# Altium footprint library unmodified_headers.PcbLib: 106 footprints (part 2 of 7)
Each footprint in its own frame and in the unit in brackets; x right, y up, seen from the top. Pads: shape width x height; smd on the part's side, far side on the other; paste and mask are expansions set on the pad; w line width, h text height; cw(c..) or ccw(c..) is an arc to the next point about the centre after c.
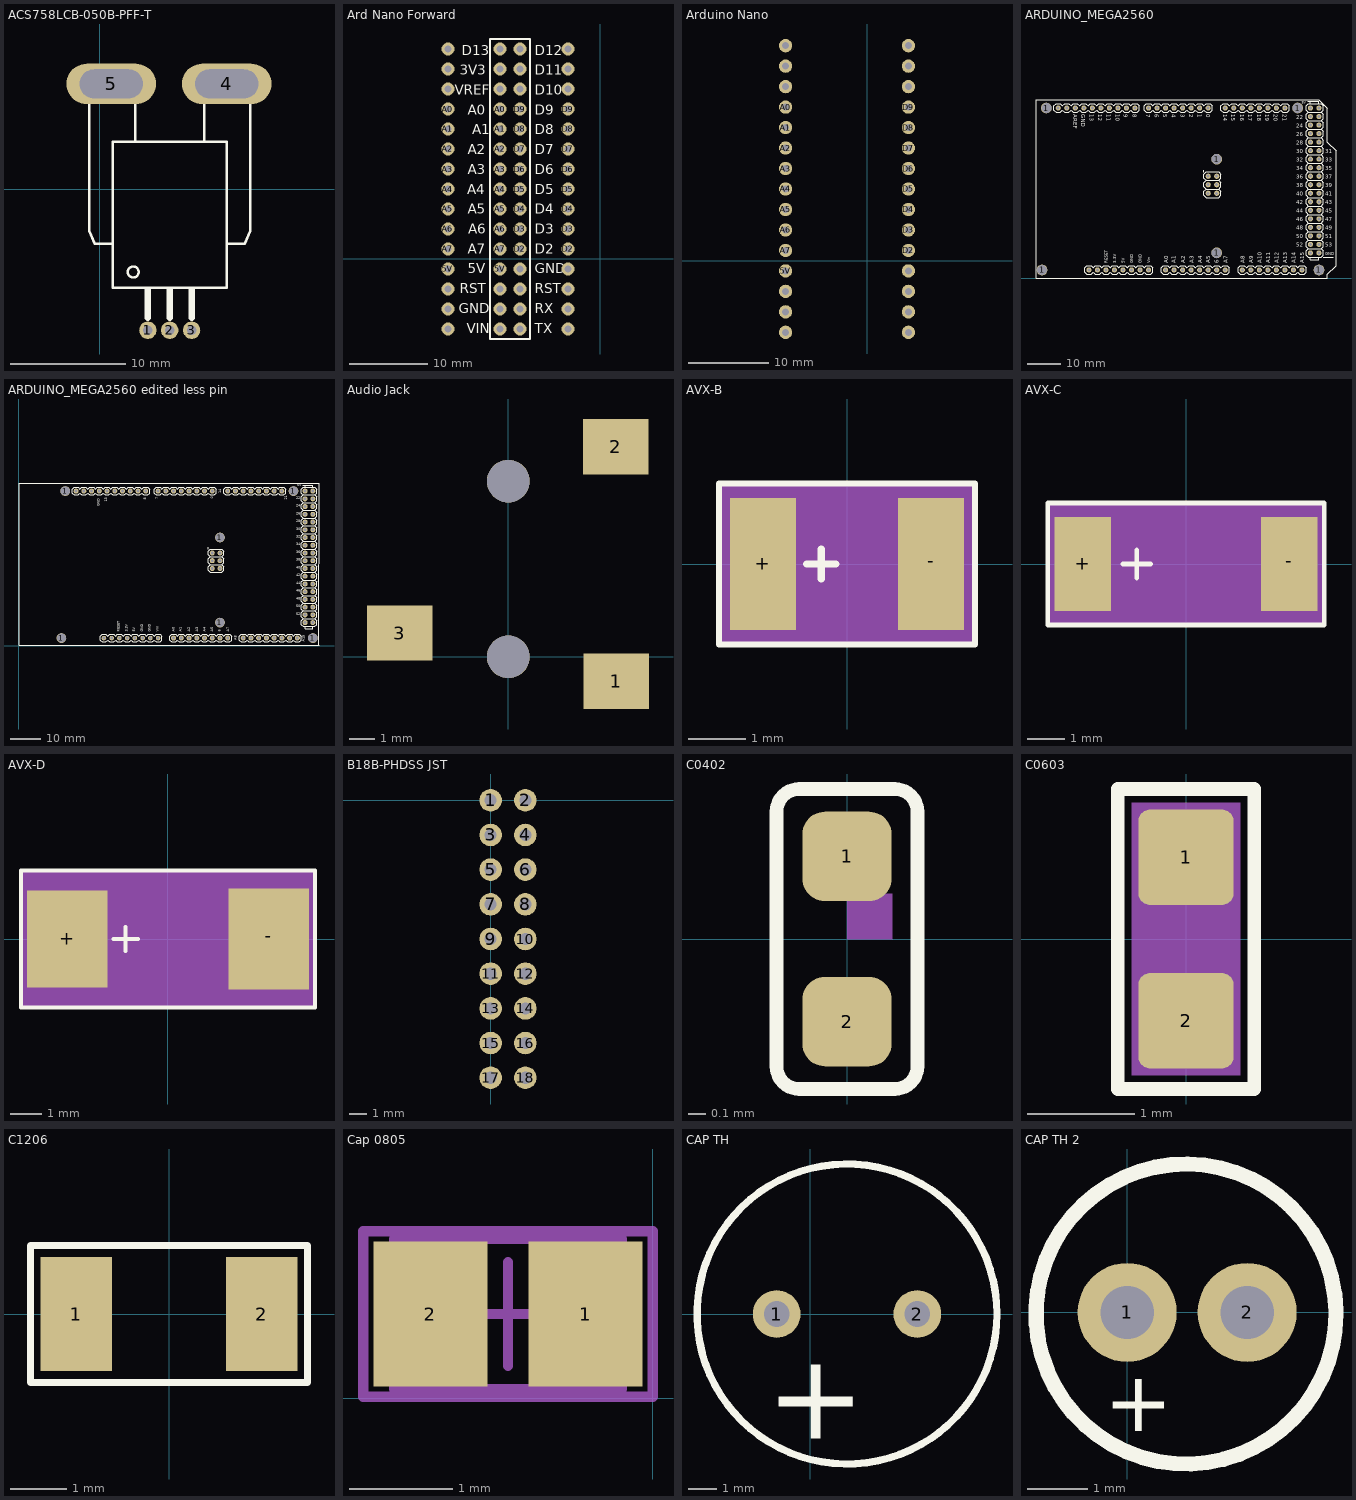
[diagram p1: the footprints below, top view; thin cyan lines are the x and y axes]

## ACS758LCB-050B-PFF-T [mil]
pads (5):
  oval 59.06x60 hole 31.5: 1(165,-483) 2(240,-483) 3(315,-483)
  oval 307.09x137.8 hole 98.43 slot 216.54 at 0 deg: 4(435,360) 5(40,360)
Top Overlay:
  circle w8: c115,-283.78 r18.8
  lines w8: -35.59,382.56 -35.59,162.09 -35.59,-143.03 -16.89,-187.32 42.17,-187.32 ; 121.89,162.09 121.89,382.56 ; 358.11,162.09 358.11,382.56 ; 436.85,-187.32 496.89,-187.32 515.59,-143.03 515.59,162.09 515.59,382.56 ; 45.12,-337.91 434.88,-337.91 434.88,162.09 45.12,162.09 45.12,-337.91
  lines w23.62: 164.8,-440.28 164.8,-346.77 ; 240,-440.28 240,-346.77 ; 315.2,-440.28 315.2,-346.77
3D body: height 275.59, standoff 0, extent 40,-347.5 440,167.5

## Ard Nano Forward [mil] "Arduino Nano, ATMEGA328"
pads (60):
  round 65 hole 35: 3.3V(-760,950) 3.3V(-500,950) 5V(-760,-50) 5V(-500,-50) A0(-760,750) A0(-500,750) A1(-760,650) A1(-500,650) A2(-760,550) A2(-500,550) A3(-760,450) A3(-500,450) A4(-760,350) A4(-500,350) A5(-760,250) A5(-500,250) A6(-760,150) A6(-500,150) A7(-760,50) A7(-500,50) AREF(-760,850) AREF(-500,850) D2(-400,50) D2(-160,50) D3(-400,150) D3(-160,150) D4(-400,250) D4(-160,250) D5(-400,350) D5(-160,350) D6(-400,450) D6(-160,450) D7(-400,550) D7(-160,550) D8(-400,650) D8(-160,650) D9(-400,750) D9(-160,750) D10(-400,850) D10(-160,850) D11(-400,950) D11(-160,950) D12(-400,1050) D12(-160,1050) D13(-760,1050) D13(-500,1050) GND(-760,-250) GND(-500,-250) GND1(-400,-50) GND1(-160,-50) RAW(-760,-350) RAW(-500,-350) RST(-760,-150) RST(-500,-150) RST1(-400,-150) RST1(-160,-150) RX1(-400,-250) RX1(-160,-250) TX0(-400,-350) TX0(-160,-350)
Top Overlay:
  lines w10: -550,-400 -350,-400 -350,1100 -550,1100 -550,-400
  text "A7" at -660.72,27.14 h50
  text "A6" at -658.34,126.43 h50
  text "A5" at -660.72,225.71 h50
  text "A4" at -663.1,325 h50
  text "A3" at -660.72,424.29 h50
  text "A2" at -660.72,523.57 h50
  text "A1" at -639.3,622.86 h50
  text "A0" at -660.72,722.14 h50
  text "VREF" at -726.9,821.43 h50
  text "3V3" at -700,920.71 h50
  text "D13" at -692.14,1020 h50
  text "5V" at -660.25,-72.14 h50
  text "RST" at -700,-171.43 h50
  text "GND" at -705.24,-270.71 h50
  text "VIN" at -665.96,-370 h50
  text "TX" at -326.9,-370 h50
  text "RX" at -326.9,-270.71 h50
  text "RST" at -326.9,-171.43 h50
  text "GND" at -326.9,-72.14 h50
  text "D12" at -326.9,1020 h50
  text "D11" at -326.9,920.71 h50
  text "D10" at -326.9,821.43 h50
  text "D9" at -326.9,722.14 h50
  text "D8" at -326.9,622.86 h50
  text "D7" at -326.9,523.57 h50
  text "D6" at -326.9,424.29 h50
  text "D5" at -326.9,325 h50
  text "D4" at -326.9,225.71 h50
  text "D3" at -326.9,126.43 h50
  text "D2" at -326.9,27.14 h50
Bottom Overlay:
  lines w10: -550,-400 -550,1100 -350,1100 -350,-400 -550,-400
  text "VIN" at -586.9,-370 h50
  text "GND" at -586.9,-270.71 h50
  text "RST" at -586.9,-171.43 h50
  text "5V" at -586.9,-72.14 h50
  text "D13" at -586.9,1020 h50
  text "3V3" at -586.9,920.71 h50
  text "VREF" at -586.9,821.43 h50
  text "A0" at -586.9,722.14 h50
  text "A1" at -586.9,622.86 h50
  text "A2" at -586.9,523.57 h50
  text "A3" at -586.9,424.29 h50
  text "A4" at -586.9,325 h50
  text "A5" at -586.9,225.71 h50
  text "A6" at -586.9,126.43 h50
  text "A7" at -586.9,27.14 h50
  text "D2" at -216.9,27.14 h50
  text "D3" at -216.9,126.43 h50
  text "D4" at -216.9,225.71 h50
  text "D5" at -216.9,325 h50
  text "D6" at -216.9,424.29 h50
  text "D7" at -216.9,523.57 h50
  text "D8" at -216.9,622.86 h50
  text "D9" at -216.9,722.14 h50
  text "D10" at -216.9,821.43 h50
  text "D11" at -216.9,920.71 h50
  text "D12" at -216.9,1020 h50
  text "GND" at -216.9,-72.14 h50
  text "RST" at -216.9,-171.43 h50
  text "RX" at -216.9,-270.71 h50
  text "TX" at -216.9,-370 h50
3D body "SAINSMART NANO V3.0 ATMEGA328.STEP": height 483.86, standoff -222.83, extent -811,-507.59 -111,1268

## Arduino Nano [mil] "Arduino Nano, ATMEGA328"
pads (30):
  round 65 hole 35: 3.3V(-400,950) 5V(-400,-50) A0(-400,750) A1(-400,650) A2(-400,550) A3(-400,450) A4(-400,350) A5(-400,250) A6(-400,150) A7(-400,50) AREF(-400,850) D2(200,50) D3(200,150) D4(200,250) D5(200,350) D6(200,450) D7(200,550) D8(200,650) D9(200,750) D10(200,850) D11(200,950) D12(200,1050) D13(-400,1050) GND(-400,-250) GND1(200,-50) RAW(-400,-350) RST(-400,-150) RST1(200,-150) RX1(200,-250) TX0(200,-350)
3D body "arduino nano.stp": height 497.64, standoff 27.17, extent -444.33,-511.65 264.33,1260

## ARDUINO_MEGA2560 [mil]
pads (98):
  round 60 hole 35: 0(2500,2000) 1(2400,2000) 2(2300,2000) 3(2200,2000) 3.3V(1400,100) 4(2100,2000) 5(2000,2000) 5V(1500,100) 5V.(3700,2000) 5V..(3800,2000) 6(1900,2000) 7(1800,2000) 8(1640,2000) 9(1540,2000) 10(1440,2000) 11(1340,2000) 12(1240,2000) 13(1140,2000) 14(2700,2000) 15(2800,2000) 16(2900,2000) 17(3000,2000) 18(3100,2000) 19(3200,2000) 20(3300,2000) 21(3400,2000) 22(3700,1900) 23(3800,1900) 24(3700,1800) 25(3800,1800) 26(3700,1700) 27(3800,1700) 28(3700,1600) 29(3800,1600) 30(3700,1500) 31(3800,1500) 32(3700,1400) 33(3800,1400) 34(3700,1300) 35(3800,1300) 36(3700,1200) 37(3800,1200) 38(3700,1100) 39(3800,1100) 40(3700,1000) 41(3800,1000) 42(3700,900) 43(3800,900) 44(3700,800) 45(3800,800) 46(3700,700) 47(3800,700) 48(3700,600) 49(3800,600) 50(3700,500) 51(3800,500) 52(3700,400) 53(3800,400) +5V_(2600,1200) A0(2000,100) A1(2100,100) A2(2200,100) A3(2300,100) A4(2400,100) A5(2500,100) A6(2600,100) A7(2700,100) A8(2900,100) A9(3000,100) A10(3100,100) A11(3200,100) A12(3300,100) A13(3400,100) A14(3500,100) A15(3600,100) AREF(940,2000) GND(1040,2000) GND.(1700,100) GND..(1600,100) GND...(3700,300) GND....(3800,300) GND__(2600,1000) I/OREF(1200,100) MISO(2500,1200) MOSI(2600,1100) N/C(1100,100) RESET(1300,100) RESET.(2500,1000) SCK(2500,1100) SCL1(740,2000) SDA1(840,2000) VIN(1800,100)
  round 125.98 hole 118.11: 1(550,100) 1(600,2000) 1(2600,300) 1(2600,1400) 1(3550,2000) 1(3800,100)
Top Overlay:
  drawing of 479 lines, arcs and shapes, not listed
  text "0" at 2475,1930 h47.6
  text "1" at 2375,1930 h47.6
  text "2" at 2275,1930 h47.6
  text "3" at 2175,1930 h47.6
  text "4" at 2075,1930 h47.6
  text "5" at 1975,1930 h47.6
  text "6" at 1875,1930 h47.6
  text "7" at 1775,1930 h47.6
  text "8" at 1615,1930 h47.6
  text "9" at 1510,1930 h47.6
  text "10" at 1415,1930 h47.6
  text "11" at 1310,1930 h47.6
  text "12" at 1210,1930 h47.6
  text "13" at 1110,1930 h47.6
  text "14" at 2675,1930 h47.6
  text "15" at 2770,1930 h47.6
  text "16" at 2875,1930 h47.6
  text "17" at 2970,1930 h47.6
  text "18" at 3075,1930 h47.6
  text "19" at 3170,1930 h47.6
  text "20" at 3270,1925 h47.6
  text "21" at 3375,1925 h47.6
  text "22" at 3531,1870 h47.6
  text "24" at 3531,1770 h47.6
  text "26" at 3531,1670 h47.6
  text "28" at 3531,1570 h47.6
  text "30" at 3531,1470 h47.6
  text "32" at 3531,1370 h47.6
  text "34" at 3531,1270 h47.6
  text "36" at 3531,1170 h47.6
  text "38" at 3531,1070 h47.6
  text "40" at 3531,970 h47.6
  text "42" at 3531,870 h47.6
  text "44" at 3531,770 h47.6
  text "46" at 3531,670 h47.6
  text "50" at 3531,470 h47.6
  text "48" at 3531,570 h47.6
  text "52" at 3531,370 h47.6
  text "31" at 3875,1471 h47.6
  text "33" at 3875,1371 h47.6
  text "35" at 3875,1271 h47.6
  text "37" at 3875,1171 h47.6
  text "39" at 3875,1071 h47.6
  text "41" at 3875,971 h47.6
  text "43" at 3875,871 h47.6
  text "45" at 3875,771 h47.6
  text "47" at 3875,671 h47.6
  text "49" at 3875,571 h47.6
  text "51" at 3875,471 h47.6
  text "53" at 3875,371 h47.6
  text "A0" at 2030,181 h47.6
  text "A1" at 2120,181 h47.6
  text "A2" at 2230,181 h47.6
  text "A3" at 2330,181 h47.6
  text "A4" at 2430,181 h47.6
  text "A5" at 2525,181 h47.6
  text "6" at 2625,181 h47.6
  text "A7" at 2730,181 h47.6
  text "A8" at 2930,181 h47.6
  text "A9" at 3030,181 h47.6
  text "A10" at 3130,181 h47.6
  text "A11" at 3230,181 h47.6
  text "A12" at 3330,181 h47.6
  text "A13" at 3430,181 h47.6
  text "A14" at 3530,181 h47.6
  text "A15" at 3625,181 h47.6
  text "GND" at 3875,271 h34
  text "RESET" at 1320,181 h34
  text "3.3V" at 1420,181 h34
  text "5V" at 1520,181 h34
  text "GND" at 1620,181 h34
  text "GND" at 1720,181 h34
  text "Vin" at 1820,181 h34
  text "GND" at 1010,1930 h47.6
  text "AREF" at 915,1930 h47.6
  text "5V" at 3600,2050 h29.75
Mechanical 16:
  rectangle: 3490,90 3510,110
  rectangle: 3390,90 3410,110
  rectangle: 3290,90 3310,110
  rectangle: 3190,90 3210,110
  rectangle: 3090,90 3110,110
  rectangle: 2990,90 3010,110
  rectangle: 2890,90 2910,110
  rectangle: 3590,90 3610,110
  rectangle: 3290,1990 3310,2010
  rectangle: 3190,1990 3210,2010
  rectangle: 3090,1990 3110,2010
  rectangle: 2990,1990 3010,2010
  rectangle: 2890,1990 2910,2010
  rectangle: 2790,1990 2810,2010
  rectangle: 2690,1990 2710,2010
  rectangle: 3390,1990 3410,2010
  rectangle: 2590,90 2610,110
  rectangle: 2490,90 2510,110
  rectangle: 2390,90 2410,110
  rectangle: 2290,90 2310,110
  rectangle: 2190,90 2210,110
  rectangle: 2090,90 2110,110
  rectangle: 1990,90 2010,110
  rectangle: 2690,90 2710,110
  rectangle: 2390,1990 2410,2010
  rectangle: 2290,1990 2310,2010
  rectangle: 2190,1990 2210,2010
  rectangle: 2090,1990 2110,2010
  rectangle: 1990,1990 2010,2010
  rectangle: 1890,1990 1910,2010
  rectangle: 1790,1990 1810,2010
  rectangle: 2490,1990 2510,2010
  rectangle: 1530,1990 1550,2010
  rectangle: 1430,1990 1450,2010
  rectangle: 1330,1990 1350,2010
  rectangle: 1230,1990 1250,2010
  rectangle: 1130,1990 1150,2010
  rectangle: 1030,1990 1050,2010
  rectangle: 930,1990 950,2010
  rectangle: 1630,1990 1650,2010
  region: 3810,1190 3810,1210 3790,1210 3790,1190
  region: 3710,1190 3710,1210 3690,1210 3690,1190
  region: 3710,1290 3710,1310 3690,1310 3690,1290
  region: 3810,1290 3810,1310 3790,1310 3790,1290
  region: 3710,1390 3710,1410 3690,1410 3690,1390
  region: 3810,1390 3810,1410 3790,1410 3790,1390
  region: 3710,1490 3710,1510 3690,1510 3690,1490
  region: 3710,1590 3710,1610 3690,1610 3690,1590
  region: 3710,1690 3710,1710 3690,1710 3690,1690
  region: 3810,1490 3810,1510 3790,1510 3790,1490
  region: 3810,1590 3810,1610 3790,1610 3790,1590
  region: 3810,1690 3810,1710 3790,1710 3790,1690
  region: 3710,1790 3710,1810 3690,1810 3690,1790
  region: 3810,1790 3810,1810 3790,1810 3790,1790
  region: 3710,1890 3710,1910 3690,1910 3690,1890
  region: 3810,1890 3810,1910 3790,1910 3790,1890
  region: 3810,390 3810,410 3790,410 3790,390
  region: 3710,390 3710,410 3690,410 3690,390
  region: 3710,490 3710,510 3690,510 3690,490
  region: 3810,490 3810,510 3790,510 3790,490
  region: 3710,590 3710,610 3690,610 3690,590
  region: 3810,590 3810,610 3790,610 3790,590
  region: 3710,690 3710,710 3690,710 3690,690
  region: 3710,790 3710,810 3690,810 3690,790
  region: 3710,890 3710,910 3690,910 3690,890
  region: 3810,690 3810,710 3790,710 3790,690
  region: 3810,790 3810,810 3790,810 3790,790
  region: 3810,890 3810,910 3790,910 3790,890
  region: 3710,990 3710,1010 3690,1010 3690,990
  region: 3810,990 3810,1010 3790,1010 3790,990
  region: 3710,1090 3710,1110 3690,1110 3690,1090
  region: 3810,1090 3810,1110 3790,1110 3790,1090
  rectangle: 3790,290 3810,310
  rectangle: 3690,290 3710,310
  rectangle: 3790,1990 3810,2010
  rectangle: 3690,1990 3710,2010
  rectangle: 1790,90 1810,110
  rectangle: 1690,90 1710,110
  rectangle: 1590,90 1610,110
  rectangle: 1490,90 1510,110
  rectangle: 1390,90 1410,110
  rectangle: 1290,90 1310,110
  rectangle: 830,1990 850,2010
  rectangle: 730,1990 750,2010
  rectangle: 1190,90 1210,110
  rectangle: 1090,90 1110,110
  region: 2610,990 2610,1010 2590,1010 2590,990
  region: 2510,990 2510,1010 2490,1010 2490,990
  region: 2510,1090 2510,1110 2490,1110 2490,1090
  region: 2610,1090 2610,1110 2590,1110 2590,1090
  region: 2510,1190 2510,1210 2490,1210 2490,1190
  region: 2610,1190 2610,1210 2590,1210 2590,1190
3D body "Pin Header 1x10 TH Pitch 2.54mm.stp": height 95.98, standoff -403.85, extent 690.01,1950 1690,2050
3D body "Pin Header 1x10 TH Pitch 2.54mm.stp": height 95.98, standoff -403.85, extent 3750,1050 3850,2050
3D body "Pin Header 1x10 TH Pitch 2.54mm.stp": height 95.98, standoff -403.85, extent 3650,1050 3750,2050
3D body "Pin Header 1x8 TH Pitch 2.54mm.stp": height 95.98, standoff -403.85, extent 1050,50 1850,150
3D body "arduino MEGA2650.STEP": height -14.96, standoff -615.35, extent -256,2 3994,2102

## ARDUINO_MEGA2560 edited less pin [mil]
pads (98):
  round 65 hole 35: 0(2500,2000) 1(2400,2000) 2(2300,2000) 3(2200,2000) 4(2100,2000) 5(2000,2000) 5V.(3700,2000) 5V..(3800,2000) 6(1900,2000) 7(1800,2000) 8(1640,2000) 9(1540,2000) 10(1440,2000) 11(1340,2000) 12(1240,2000) 13(1140,2000) 14(2700,2000) 15(2800,2000) 16(2900,2000) 17(3000,2000) 18(3100,2000) 19(3200,2000) 20(3300,2000) 21(3400,2000) 22(3700,1900) 23(3800,1900) 24(3700,1800) 25(3800,1800) 26(3700,1700) 27(3800,1700) 28(3700,1600) 29(3800,1600) 30(3700,1500) 31(3800,1500) 32(3700,1400) 33(3800,1400) 34(3700,1300) 35(3800,1300) 36(3700,1200) 37(3800,1200) 38(3700,1100) 39(3800,1100) 40(3700,1000) 41(3800,1000) 42(3700,900) 43(3800,900) 44(3700,800) 45(3800,800) 46(3700,700) 47(3800,700) 48(3700,600) 49(3800,600) 50(3700,500) 51(3800,500) 52(3700,400) 53(3800,400) +5V_(2600,1200) A0(2000,100) A1(2100,100) A2(2200,100) A3(2300,100) A4(2400,100) A5(2500,100) A6(2600,100) A7(2700,100) A8(2900,100) A9(3000,100) A10(3100,100) A11(3200,100) A12(3300,100) A13(3400,100) A14(3500,100) A15(3600,100) AREF(940,2000) GND(1040,2000) GND...(3700,300) GND....(3800,300) GND__(2600,1000) MISO(2500,1200) MOSI(2600,1100) RESET.(2500,1000) SCK(2500,1100) SCL1(740,2000) SDA1(840,2000)
  round 125.98 hole 118.11: 1(550,100) 1(600,2000) 1(2600,300) 1(2600,1400) 1(3550,2000) 1(3800,100)
  round 60 hole 35: 3.3V(1400,100) 5V(1500,100) GND.(1700,100) GND..(1600,100) I/OREF(1200,100) N/C(1100,100) RESET(1300,100) VIN(1800,100)
Top Overlay:
  drawing of 473 lines, arcs and shapes, not listed
  text "RESET" at 1320,181 h59.06
  text "3.3V" at 1420,181 h59.06
  text "5V" at 1520,181 h59.06
  text "GND" at 1620,181 h59.06
  text "GND" at 1720,181 h59.06
  text "Vin" at 1820,181 h59.06
  text "0" at 2524,1898 h59.06
  text "7" at 1816,1895 h59.06
  text "8" at 1660,1890 h59.06
  text "13" at 1154,1865 h59.06
  text "14" at 2630,1969 h59.06
  text "21" at 3482,1889 h59.06
  text "22" at 3583,1884 h59.06
  text "24" at 3583,1784 h59.06
  text "26" at 3583,1684 h59.06
  text "28" at 3583,1584 h59.06
  text "30" at 3583,1484 h59.06
  text "32" at 3583,1384 h59.06
  text "34" at 3583,1284 h59.06
  text "36" at 3583,1184 h59.06
  text "38" at 3583,1084 h59.06
  text "40" at 3583,984 h59.06
  text "42" at 3583,884 h59.06
  text "44" at 3583,784 h59.06
  text "46" at 3583,684 h59.06
  text "50" at 3583,484 h59.06
  text "48" at 3583,584 h59.06
  text "52" at 3583,384 h59.06
  text "A0" at 2030,181 h59.06
  text "A1" at 2120,181 h59.06
  text "A2" at 2230,181 h59.06
  text "A3" at 2330,181 h59.06
  text "A4" at 2430,181 h59.06
  text "A5" at 2525,181 h59.06
  text "6" at 2625,181 h59.06
  text "A7" at 2730,181 h59.06
  text "A8" at 2828,69 h59.06
  text "A15" at 3710,55 h59.06
  text "GND" at 1056,1802 h59.06
  text "5V" at 3600,2050 h59.06
Mechanical 16:
  rectangle: 1790,90 1810,110
  rectangle: 1690,90 1710,110
  rectangle: 1590,90 1610,110
  rectangle: 1490,90 1510,110
  rectangle: 1390,90 1410,110
  rectangle: 1290,90 1310,110
  rectangle: 1190,90 1210,110
  rectangle: 1090,90 1110,110
  rectangle: 3490,90 3510,110
  rectangle: 3390,90 3410,110
  rectangle: 3290,90 3310,110
  rectangle: 3190,90 3210,110
  rectangle: 3090,90 3110,110
  rectangle: 2990,90 3010,110
  rectangle: 2890,90 2910,110
  rectangle: 3290,1990 3310,2010
  rectangle: 3190,1990 3210,2010
  rectangle: 3090,1990 3110,2010
  rectangle: 2990,1990 3010,2010
  rectangle: 2890,1990 2910,2010
  rectangle: 2790,1990 2810,2010
  rectangle: 2690,1990 2710,2010
  rectangle: 3390,1990 3410,2010
  rectangle: 2590,90 2610,110
  rectangle: 2490,90 2510,110
  rectangle: 2390,90 2410,110
  rectangle: 2290,90 2310,110
  rectangle: 2190,90 2210,110
  rectangle: 2090,90 2110,110
  rectangle: 1990,90 2010,110
  rectangle: 2690,90 2710,110
  rectangle: 2390,1990 2410,2010
  rectangle: 2290,1990 2310,2010
  rectangle: 2190,1990 2210,2010
  rectangle: 2090,1990 2110,2010
  rectangle: 1990,1990 2010,2010
  rectangle: 1890,1990 1910,2010
  rectangle: 1790,1990 1810,2010
  rectangle: 2490,1990 2510,2010
  rectangle: 1530,1990 1550,2010
  rectangle: 1430,1990 1450,2010
  rectangle: 1330,1990 1350,2010
  rectangle: 1230,1990 1250,2010
  rectangle: 1130,1990 1150,2010
  rectangle: 1030,1990 1050,2010
  rectangle: 930,1990 950,2010
  rectangle: 1630,1990 1650,2010
  region: 3810,1190 3810,1210 3790,1210 3790,1190
  region: 3710,1190 3710,1210 3690,1210 3690,1190
  region: 3710,1290 3710,1310 3690,1310 3690,1290
  region: 3810,1290 3810,1310 3790,1310 3790,1290
  region: 3710,1390 3710,1410 3690,1410 3690,1390
  region: 3810,1390 3810,1410 3790,1410 3790,1390
  region: 3710,1490 3710,1510 3690,1510 3690,1490
  region: 3710,1590 3710,1610 3690,1610 3690,1590
  region: 3710,1690 3710,1710 3690,1710 3690,1690
  region: 3810,1490 3810,1510 3790,1510 3790,1490
  region: 3810,1590 3810,1610 3790,1610 3790,1590
  region: 3810,1690 3810,1710 3790,1710 3790,1690
  region: 3710,1790 3710,1810 3690,1810 3690,1790
  region: 3810,1790 3810,1810 3790,1810 3790,1790
  region: 3710,1890 3710,1910 3690,1910 3690,1890
  region: 3810,1890 3810,1910 3790,1910 3790,1890
  region: 3810,390 3810,410 3790,410 3790,390
  region: 3710,390 3710,410 3690,410 3690,390
  region: 3710,490 3710,510 3690,510 3690,490
  region: 3810,490 3810,510 3790,510 3790,490
  region: 3710,590 3710,610 3690,610 3690,590
  region: 3810,590 3810,610 3790,610 3790,590
  region: 3710,690 3710,710 3690,710 3690,690
  region: 3710,790 3710,810 3690,810 3690,790
  region: 3710,890 3710,910 3690,910 3690,890
  region: 3810,690 3810,710 3790,710 3790,690
  region: 3810,790 3810,810 3790,810 3790,790
  region: 3810,890 3810,910 3790,910 3790,890
  region: 3710,990 3710,1010 3690,1010 3690,990
  region: 3810,990 3810,1010 3790,1010 3790,990
  region: 3710,1090 3710,1110 3690,1110 3690,1090
  region: 3810,1090 3810,1110 3790,1110 3790,1090
  rectangle: 3790,290 3810,310
  rectangle: 3690,290 3710,310
  rectangle: 3790,1990 3810,2010
  rectangle: 3690,1990 3710,2010
  rectangle: 830,1990 850,2010
  rectangle: 730,1990 750,2010
  region: 2610,990 2610,1010 2590,1010 2590,990
  region: 2510,990 2510,1010 2490,1010 2490,990
  region: 2510,1090 2510,1110 2490,1110 2490,1090
  region: 2610,1090 2610,1110 2590,1110 2590,1090
  region: 2510,1190 2510,1210 2490,1210 2490,1190
  region: 2610,1190 2610,1210 2590,1210 2590,1190
3D body "Pin Header 1x8 TH Pitch 2.54mm.stp": height 95.98, standoff -403.85, extent 1050,50 1850,150
3D body "Pin Header 1x10 TH Pitch 2.54mm.stp": height 95.98, standoff -403.85, extent 690.01,1950 1690,2050
3D body "Pin Header 1x10 TH Pitch 2.54mm.stp": height 95.98, standoff -403.85, extent 3750,1050 3850,2050
3D body "Pin Header 1x10 TH Pitch 2.54mm.stp": height 95.98, standoff -403.85, extent 3650,1050 3750,2050
3D body "arduino MEGA2650.STEP": height -68.9, standoff -669.29, extent -256,2 3994,2102

## Audio Jack [mm]
pads (5):
  rect 2.6x2.2 all layers, no hole: 1(4.3,-0.975) 2(4.275,8.375) 3(-4.325,0.95)
  round 1.7 hole 1.7: ""(0,0) ""(0,7)
3D body "CUI_SJ-3523-SMT-TR.step": height 5, standoff -0.8, extent -4.525,-5.975 4.475,11.025

## AVX-B [mil]
pads (2):
  rect 45x90 smd: +(-57.5,0) -(57.5,0)
Top Overlay:
  lines w4: -87.5,-55 -87.5,55 87.5,55 87.5,-55 -87.5,-55
  lines w5: -27.5,0 -7.5,0 ; -17.5,-10 -17.5,10
Mechanical 16:
  rectangle: -87.5,-55 87.5,55
3D body "User Library-Tantalum Capacitor Case B_Tantalum case B part1.SLDPRT": height 82.68, standoff 3.94, extent -71.8,-55.51 66,55.51

## AVX-C [mil]
pads (2):
  rect 60x100 smd: +(-110,0) -(110,0)
Top Overlay:
  lines w5: -67.5,0 -37.5,0 ; -52.5,-15 -52.5,15 ; -147.5,-65 -147.5,65 147.5,65 147.5,-65 -147.5,-65
Mechanical 16:
  rectangle: -147.5,-65 147.5,65
3D body "User Library-AVX_C_CASE.SLDPRT": height 106.3, standoff 0, extent -119.07,-64.94 121.09,66.95

## AVX-D [mil]
pads (2):
  rect 100x120 smd: +(-125,0)
  rect 100x125 smd: -(125,0)
Top Overlay:
  lines w5: -67.5,0 -37.5,0 ; -52.5,-15 -52.5,15 ; -182.5,-85 -182.5,85 182.5,85 182.5,-85 -182.5,-85
Mechanical 16:
  rectangle: -182.5,-85 182.5,85
3D body "User Library-AVX_D_CASE.SLDPRT": height 118.62, standoff 0, extent -147.66,-88.59 143.69,86.61

## B18B-PHDSS JST [mm]
pads (18):
  round 1.3 hole 0.7: 1(0,0) 2(2,0) 3(0,-2) 4(2,-2) 5(0,-4) 6(2,-4) 7(0,-6) 8(2,-6) 9(0,-8) 10(2,-8) 11(0,-10) 12(2,-10) 13(0,-12) 14(2,-12) 15(0,-14) 16(2,-14) 17(0,-16) 18(2,-16)
3D body "B18B-PHDSS.STEP": height 6.5, standoff -3, extent -1.499,-17.976 3.501,1.924

## C0402 [mil]
pads (2):
  rrect50% 19.69x19.69 smd: 1(0,18.21) 2(0,-18.21)
Top Overlay:
  lines w3: -15.53,-28.03 ccw(c-10.53,-28.03) -10.53,-33.03 10.53,-33.03 ccw(c10.53,-28.03) 15.53,-28.03 15.53,28.03 ccw(c10.53,28.03) 10.53,33.03 -10.53,33.03 ccw(c-10.53,28.03) -15.53,28.03 -15.53,-28.03
Mechanical 16:
  region: 0,0 10,0 10,10 0,10

## C0603 [mil]
pads (2):
  rrect25% 35x35 smd: 1(0,30) 2(0,-30)
Top Overlay:
  lines w5: -25,-55 -25,55 25,55 25,-55 -25,-55
Mechanical 16:
  region: -20,50 -20,-50 20,-50 20,50
3D body: height 51.18, standoff 0, extent -18.4,-36.45 19,32.45

## C1206 [mil]
pads (2):
  rect 50x80 smd: 1(-65,0) 2(65,0)
Top Overlay:
  lines w5: -97,-48 97,-48 97,48 -97,48 -97,-48
3D body: height 78.74, standoff 3.94, extent -81,-45 82,47

## Cap 0805 [mm]
pads (2):
  rect 1.1x1.4 smd: 1(-0.647,0.813) 2(-2.147,0.813)
Mechanical 13:
  lines w0.1: -2.497,0.088 -0.297,0.088 -0.297,1.538 -2.497,1.538 -2.497,0.088
Mechanical 15:
  lines w0.1: -1.897,0.813 -0.897,0.813 ; -1.397,0.313 -1.397,1.313 ; -2.797,0.013 0.003,0.013 0.003,1.613 -2.797,1.613 -2.797,0.013
3D body "CAP0805.stp": height -0.43, standoff -1.21, extent -2.397,0.188 -0.397,1.438

## CAP TH [mil]
pads (2):
  round 65 hole 35: 1(-46,0) 2(146,0)
Top Overlay:
  circle w10: c50,0 r204.72
  text "+" at -60,-170 h118.11
3D body: height 525.2, standoff 15.75, extent -150.78,-199.78 250.79,201.8

## CAP TH 2 [mil]
pads (2):
  round 65 hole 35: 1(0,0) 2(78.74,0)
Top Overlay:
  lines w10: 137.02,1.17 ccw(c38.61,-1.03) 137.04,-1.03
  text "+" at -15,-78 h39.37
3D body "CAP-ALU-H11.2D5.0P2.0LD0.5 LD long.stp": height 520.47, standoff -708.27, extent -59.04,-99.07 137.04,97